# Altium schematic symbol library TUSB320LAIRWBR.SchLib: 1 symbol
Pins are listed as number, name and electrical type; pins without a type are passive.

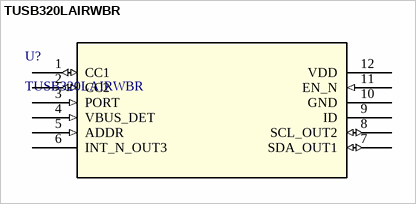
[diagram p0: symbol TUSB320LAIRWBR]

## TUSB320LAIRWBR
designator U?
Type-C Configuration Channel Logic and Port Control 12-X2QFN -40 to 85; Manufacturer_Name: Texas Instruments; Copyright: Copyright (C) 2026 Ultra Librarian. All rights reserved.; Manufacturer_Part_Number: TUSB320LAIRWBR; RefDes: RefDes; Type: Type
footprint RWB0012A_TEX
pins: 1 CC1 (io), 2 CC2 (io), 3 PORT (in), 4 VBUS_DET (in), 5 ADDR (in), 6 INT_N_OUT3 (oc), 7 SDA_OUT1 (io), 8 SCL_OUT2 (io), 9 ID (oc), 10 GND (power), 11 EN_N (in), 12 VDD (power)